# Altium footprint library AltiumLibraryDDT.PcbLib: 106 footprints (part 4 of 7)
Each footprint in its own frame and in the unit in brackets; x right, y up, seen from the top. Pads: shape width x height; smd on the part's side, far side on the other; paste and mask are expansions set on the pad; w line width, h text height; cw(c..) or ccw(c..) is an arc to the next point about the centre after c.
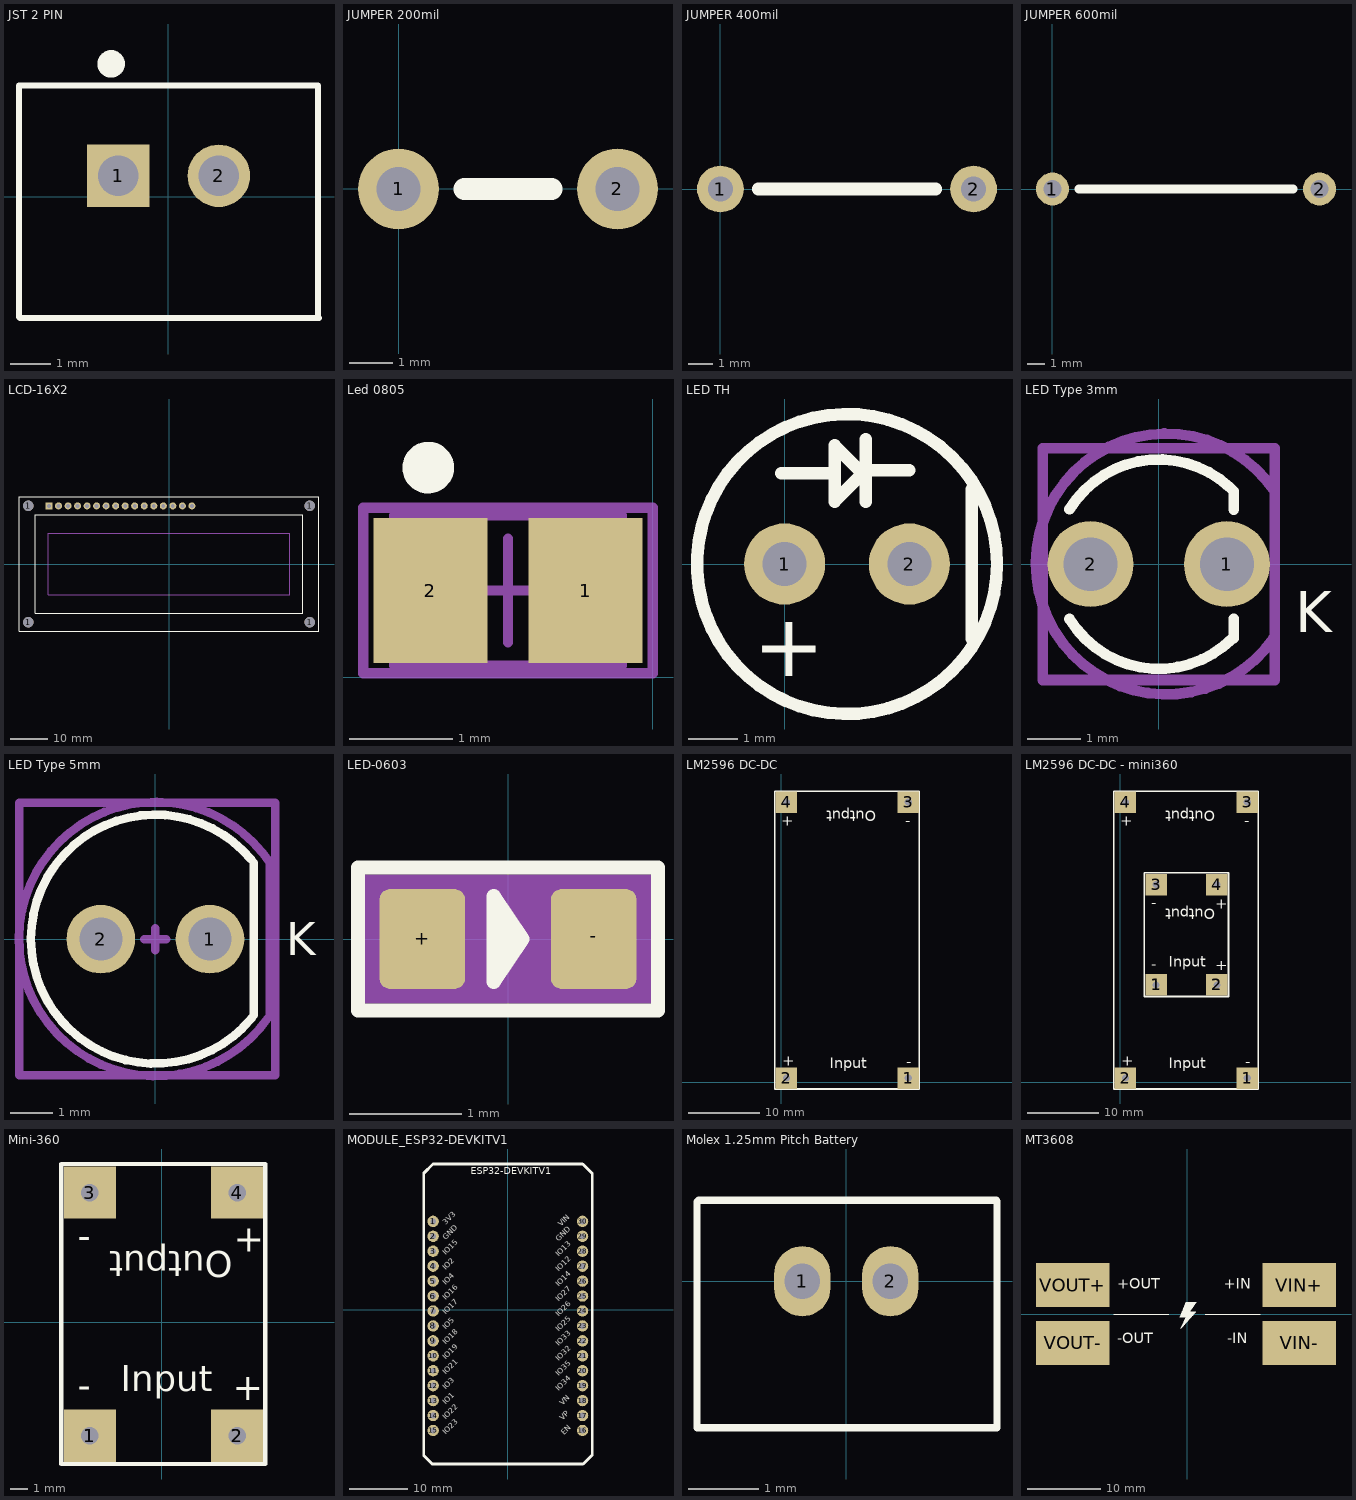
[diagram p3: the footprints below, top view; thin cyan lines are the x and y axes]

## JST 2 PIN [mm] "BATTERY IN"
pads (2):
  rect 1.55x1.55 hole 1: 1(-1.25,0.525)
  round 1.55 hole 1: 2(1.25,0.525)
Top Overlay:
  circle w0.5: c-1.422,3.302 r0.092
  lines w0.15: -3.708,-2.972 -3.683,-2.997 3.734,-2.997 3.708,-2.972 3.708,2.769 -3.708,2.769 -3.708,-2.972
3D body "JST 2pin.stp": height 6.85, standoff -3.45, extent -3.715,-2.946 3.715,2.781

## JUMPER 200mil [mil] "JUMPER for one layer PCB"
pads (2):
  round 74 hole 40: 1(0,0) 2(200,0)
Top Overlay:
  lines w20: 60,0 140,0

## JUMPER 400mil [mil] "JUMPER for one layer PCB"
pads (2):
  round 74 hole 40: 1(0,0) 2(400,0)
Top Overlay:
  lines w20: 60,0 340,0

## JUMPER 600mil [mil] "JUMPER for one layer PCB"
pads (2):
  round 74 hole 40: 1(0,0) 2(600,0)
Top Overlay:
  lines w20: 60,0 540,0

## LCD-16X2 [mil]
pads (20):
  round 110.24 hole 110.24: 1(-1476.38,-610.24) 1(-1476.38,610.24) 1(1476.38,-610.24) 1(1476.38,610.24)
  rect 74x74 hole 40: 1(-1259.84,610.24)
  round 74 hole 40: 2(-1159.84,610.24) 3(-1059.84,610.24) 4(-959.84,610.24) 5(-859.84,610.24) 6(-759.84,610.24) 7(-659.84,610.24) 8(-559.84,610.24) 9(-459.84,610.24) 10(-359.84,610.24) 11(-259.84,610.24) 12(-159.84,610.24) 13(-59.84,610.24) 14(40.16,610.24) 15(140.16,610.24) 16(240.16,610.24)
Top Overlay:
  lines w8: -1574.8,-708.66 1574.8,-708.66 1574.8,708.66 -1574.8,708.66 -1574.8,-708.66 ; -1403.54,-517.72 1403.54,-517.72 1403.54,517.72 -1403.54,517.72 -1403.54,-517.72
Mechanical 12:
  lines w8: -1269.69,-322.83 1269.69,-322.83 1269.69,322.83 -1269.69,322.83 -1269.69,-322.83
Mechanical 16:
  text "1" at -1350,600 h62
3D body "Pin Header 16 x 1 TH 2.54mm Pitch.stp": height 300, standoff -150, extent -1309,561 291,661
3D body "LCD_16x2.stp": height 597.64, standoff 144.88, extent -1574.8,-706.66 1574.81,710.67

## Led 0805 [mm]
pads (2):
  rect 1.1x1.4 smd: 1(-0.647,0.838) 2(-2.147,0.838)
Top Overlay:
  circle w0.25: c-2.168,2.026 r0.125
Mechanical 13:
  lines w0.1: -2.497,0.113 -2.497,1.563 -0.297,1.563 -0.297,0.113 -2.497,0.113
Mechanical 15:
  lines w0.1: -1.897,0.838 -0.897,0.838 ; -1.397,0.338 -1.397,1.338 ; -2.797,0.038 -2.797,1.638 0.003,1.638 0.003,0.038 -2.797,0.038
3D body "User Library-led_0805.step": height -0.43, standoff -1.53, extent -2.384,0.216 -0.364,1.466

## LED TH [mil]
pads (2):
  round 65 hole 35: 1(0,0) 2(100,0)
Top Overlay:
  circle w10: c50,0 r120.08
  lines w10: -2.5,72.5 40,72.5 ; 65,50 65,100 ; 100,75 65,75 ; 150,-60 150,60 ; 65,75 60,75 40,95 40,50 65,75
  text "+" at -25,-90 h50
3D body "led5mm.stp": height 354.33, standoff 0, extent -68.1,-118.1 168.12,118.12

## LED Type 3mm [mm] "THT, LED-3mm, 2pin- Body 4.15mm(max)"
height 10.9
pads (2):
  round 1.6 hole 1: 1(1.27,0) 2(-1.27,0)
Top Overlay:
  lines w0.2: -1.661,-1.022 ccw(c0,0) 1.379,-1.379 ; -1.661,1.022 cw(c0,0) 1.312,1.443 1.397,1.358 1.397,1.016 ; 1.397,-1.379 1.397,-1.016
  text "K" at 2.54,-1.27 h0.76
Mechanical 13:
  lines w0.2: -2.159,-2.159 -2.159,2.159 2.159,2.159 2.159,-2.159 -2.159,-2.159
Mechanical 15:
  lines w0.2: 2.139,-1.38 cw(c0.143,0.003) 2.159,1.358 2.159,-1.379
  text ".Designator" at 0,0 h0.76
  text "K" at 2.54,-1.27 h0.76
3D body "WL-TMRW_3mm.stp": height 10.9, standoff -21.2, extent -1.934,-1.939 1.87,1.94

## LED Type 5mm [mm] "THT, LED-5mm, 2pin- Body 5.8mm"
height 12.1
pads (2):
  round 1.6 hole 1: 1(1.27,0) 2(-1.27,0)
Top Overlay:
  lines w0.2: -2.47,1.52 cw(c0,0) 2.228,1.857 ; -2.369,1.672 ccw(c0,0) 2.239,-1.844 ; 2.286,-1.778 2.286,1.778
  text "K" at 3.048,-0.381 h0.76
Mechanical 13:
  lines w0.2: -3.175,-3.175 -3.175,3.175 2.794,3.175 2.794,-3.175 -3.175,-3.175
Mechanical 15:
  lines w0.2: -0.254,0 0.254,0 ; 0,-0.254 0,0.254 ; 2.616,-1.846 cw(c0.014,0.003) 2.667,1.778 2.667,-1.778
  text "K" at 3.048,-0.381 h0.76
  text ".Designator" at 0,0 h0.76
3D body "WL-TMRW_5mm.stp": height 12.1, standoff -23.3, extent -2.9,-2.9 2.5,2.9

## LED-0603 [mil]
pads (2):
  rrect25% 30x35 smd: +(-30,0) -(30,0)
Top Overlay:
  lines w5: -2.5,-10 -2.5,10 ; 0,-7.5 -5,-15 -5,15 0,7.5 ; 0,-7.5 5,0 0,7.5 ; 0,-7.5 0,7.5 ; -52.5,-25 52.5,-25 52.5,25 -52.5,25 -52.5,-25
Mechanical 16:
  rectangle: -50,-22.5 50,22.5
3D body "LED 0603 single color.stp": height 27.6, standoff -0.3, extent -30.5,-15.5 32.5,15.5

## LM2596 DC-DC [mm]
pads (4):
  rect 3x3 hole 1: 1(17.7,0.6) 2(0.7,0.6) 3(17.7,39.1) 4(0.7,39.1)
Top Overlay:
  lines w0.254: -0.914,-0.914 -0.737,-0.914 19.202,-0.914 19.228,-0.889 19.228,40.538 19.152,40.615 -0.914,40.615 -0.914,-0.889
  text "Output" at 13.208,38.379 h2.54
  text "Input" at 6.756,1.524 h2.54
  text "-" at 17.4,2.2 h1.52
  text "+" at 0.1,2.3 h1.52
  text "+" at 0,35.814 h1.52
  text "-" at 17.272,35.814 h1.52
3D body "LM2596-ADJ.SLDPRT": height 12.8, standoff 0, extent -0.747,-0.888 19.253,40.512

## LM2596 DC-DC - mini360 [mm]
pads (10):
  rect 3x3 hole 1: 1(4.978,13.589) 1(4.978,13.589) 1(17.7,0.6) 2(0.7,0.6) 2(13.462,13.589) 2(13.462,13.589) 3(4.978,27.584) 3(17.7,39.1) 4(0.7,39.1) 4(13.462,27.584)
Top Overlay:
  lines w0.254: -0.914,-0.914 -0.737,-0.914 19.202,-0.914 19.228,-0.889 19.228,40.538 19.152,40.615 -0.914,40.615 -0.914,-0.889 ; 3.327,11.963 3.327,29.235 15.088,29.235 15.088,11.963 3.327,11.963
  text "-" at 4.291,24.362 h1.52
  text "+" at 13.26,24.196 h1.52
  text "+" at 13.209,15.637 h1.52
  text "Output" at 13.208,24.714 h2.54
  text "Input" at 6.756,15.672 h2.54
  text "-" at 17.272,35.814 h1.52
  text "+" at 0,35.814 h1.52
  text "+" at 0.1,2.3 h1.52
  text "-" at 17.4,2.2 h1.52
  text "Input" at 6.756,1.524 h2.54
  text "Output" at 13.208,38.379 h2.54
  text "-" at 4.291,15.751 h1.52
3D body "LM2596-ADJ.SLDPRT": height 12.8, standoff 0, extent -0.747,-0.888 19.253,40.512

## Mini-360 [mm] "DC-DC Power source"
pads (6):
  rect 3x3 hole 1: 1(-4.14,-6.53) 1(-4.14,-6.53) 2(4.344,-6.53) 2(4.344,-6.53) 3(-4.14,7.465) 4(4.344,7.465)
Top Overlay:
  lines w0.254: -5.791,-8.156 -5.791,9.116 5.969,9.116 5.969,-8.156 -5.791,-8.156
  text "-" at -4.827,4.243 h1.52
  text "+" at 4.141,4.077 h1.52
  text "+" at 4.091,-4.482 h1.52
  text "Output" at 4.09,4.595 h2.54
  text "Input" at -2.362,-4.447 h2.54
  text "-" at -4.827,-4.368 h1.52

## MODULE_ESP32-DEVKITV1 [mil]
pads (30):
  round 76 / inner round 60 / far side round 76 hole 39.37: 1(-500,590.55) 2(-500,490.55) 3(-500,390.55) 4(-500,290.55) 5(-500,190.55) 6(-500,90.55) 7(-500,-9.45) 8(-500,-109.45) 9(-500,-209.45) 10(-500,-309.45) 11(-500,-409.45) 12(-500,-509.45) 13(-500,-609.45) 14(-500,-709.45) 15(-500,-809.45) 16(500,-809.45) 17(500,-709.45) 18(500,-609.45) 19(500,-509.45) 20(500,-409.45) 21(500,-309.45) 22(500,-209.45) 23(500,-109.45) 24(500,-9.45) 25(500,90.55) 26(500,190.55) 27(500,290.55) 28(500,390.55) 29(500,490.55) 30(500,590.55)
Top Overlay:
  lines w19.68: -563.39,-976.77 -563.39,911.81 -500.79,974.41 500.79,974.41 564.96,910.24 564.96,-972.83 503.94,-1033.86 -506.3,-1033.86 -563.39,-976.77
  text "ESP32-DEVKITV1" at -247.64,888.58 h77.5
  text "3V3" at -406.69,553.55 h62
  text "GND" at -406.69,453.55 h62
  text "IO15" at -406.69,353.55 h62
  text "IO2" at -406.69,253.55 h62
  text "IO4" at -406.69,153.55 h62
  text "IO16" at -406.69,53.55 h62
  text "IO17" at -406.69,-46.45 h62
  text "IO5" at -406.69,-146.45 h62
  text "IO18" at -406.69,-246.45 h62
  text "IO19" at -406.69,-346.45 h62
  text "IO21" at -406.69,-446.45 h62
  text "IO3" at -406.69,-546.45 h62
  text "IO1" at -406.69,-646.45 h62
  text "IO22" at -406.69,-746.45 h62
  text "IO23" at -406.69,-846.45 h62
  text "VIN" at 368.9,543.31 h62
  text "GND" at 349.6,442.92 h62
  text "IO13" at 349.6,342.92 h62
  text "IO12" at 349.6,242.91 h62
  text "IO14" at 349.6,142.91 h62
  text "IO27" at 349.6,42.91 h62
  text "IO26" at 349.6,-57.09 h62
  text "IO25" at 349.6,-157.09 h62
  text "IO33" at 349.6,-257.08 h62
  text "IO32" at 349.6,-357.08 h62
  text "IO35" at 349.6,-457.08 h62
  text "IO34" at 349.6,-557.09 h62
  text "VN" at 377.95,-652.75 h62
  text "VP" at 377.95,-752.75 h62
  text "EN" at 387.8,-850 h62
3D body "ESP-32_v1.STEP": height 283.46, standoff -204.72, extent -559.84,-1027.17 562.21,977.95

## Molex 1.25mm Pitch Battery [mm] "Molex PICOBLADE 53047, 1.25mm Pitch, 2 Way, 1 Row, Straight PCB Header, Through Hole"
pads (2):
  oval 0.8x1 hole 0.5: 1(-0.625,0) 2(0.625,0)
Top Overlay:
  lines w0.1: -2.12,-2.08 -2.12,1.13 -2.1,1.15 -1.15,1.15 1.15,1.15 2.13,1.15 2.14,1.14 2.14,-2.08 -2.12,-2.08
3D body "5716.stp": height 4.21, standoff -2.19, extent -2.115,-2.07 2.135,1.13

## MT3608 [mm] "Step Up board"
pads (4):
  rect 10x6 smd: VIN+(15.305,3.937) VIN-(15.305,-3.937) VOUT+(-15.606,3.937) VOUT-(-15.606,-3.937)
Top Overlay:
  drawing of 3 lines, arcs and shapes, not listed
  text "+OUT" at -9.5,3 h2.5
  text "-OUT" at -9.5,-4.5 h2.5
  text "-IN" at 5.5,-4.5 h2.5
  text "+IN" at 5,3 h2.5
3D body "?????????? DC-DC ???????????????.STEP": height 6.5, standoff 0, extent -18.35,-8.85 18.65,8.65